# Altium schematic symbol library 芯片.SchLib: 9 symbols
Pins are listed as number, name and electrical type; pins without a type are passive.

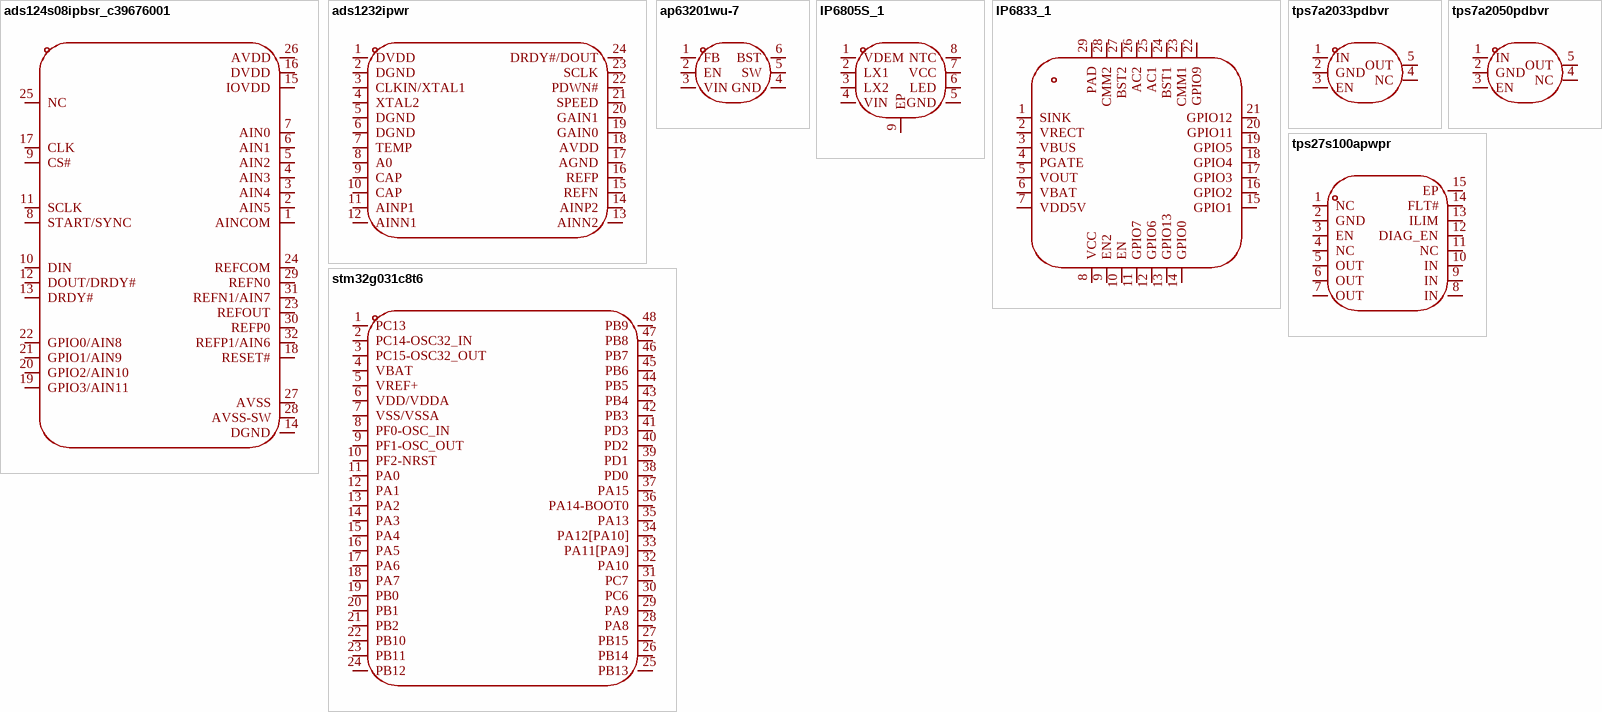
[diagram p0: symbols ads124s08ipbsr_c39676001 to tps27s100apwpr]

## ads124s08ipbsr_c39676001
designator U??  (value not drawn)
分辨率(位):24;采样率:4kHz;工作电压:2.7V~5.25V;接口类型:SPI;; Manufacturer: TI(德州仪器); AddInBom: yes; ModelId: 0723864a05e7424ab80b3c78d6a7d93a; ModelName: TQFP-32_L5.0-W5.0-H1.2-LS7.0-P0.50; ModelTransform: 277.58783,277.58783,0,90,0,0,0.013,0,0; Resolution (Bits): 24; Sampling Rate: 4kHz; number of channels: 12; Interface: SPI; differential input: 是; Clock/Oscillator: 内置; Clock Frequency: 4.096MHz; Programmable Gain: 支持; Quiescent Current (Iq): 280uA; Symbol: ADS124S08IPBSR_C39676001; LCSC Part Name: 具有PGA和电压基准的低功耗、低噪声、高集成度6通道及12通道4kSPS、24位∑-Δ ADC; SupplierPart: C39676001; ManufacturerPart: ADS124S08IPBSR; Supplier Footprint: TQFP-32(5x5); JLCPCB Part Class: Extended Part; Datasheet: https://www.ti.com.cn/cn/lit/ds/symlink/ads124s08.pdf?ts=1739413233444&ref_url=https%253A%252F%252Fwww.ti.com.cn%252Fproduct%252Fcn%252FADS124S08; Supplier: LCSC; ConvertToPcb: yes; FootprintName: TQFP-32_L5.0-W5.0-P0.50-LS7.0-BL; Voltage - Supply: 2.7V~5.25V; Operating Temperature: -50℃~+125℃; Voltage Reference: 内置; Features: 多路复用器；双极性电源；自动校准；内置温度传感器
footprint TQFP-32_L5.0-W5.0-P0.50-LS7.0-BL
pins: 1 AINCOM, 2 AIN5, 3 AIN4, 4 AIN3, 5 AIN2, 6 AIN1, 7 AIN0, 8 START/SYNC, 9 CS#, 10 DIN, 11 SCLK, 12 DOUT/DRDY#, 13 DRDY#, 14 DGND, 15 IOVDD, 16 DVDD, 17 CLK, 18 RESET#, 19 GPIO3/AIN11, 20 GPIO2/AIN10, 21 GPIO1/AIN9, 22 GPIO0/AIN8, 23 REFOUT, 24 REFCOM, 25 NC, 26 AVDD, 27 AVSS, 28 AVSS-SW, 29 REFN0, 30 REFP0, 31 REFN1/AIN7, 32 REFP1/AIN6

## ads1232ipwr
designator U??  (value not drawn)
分辨率(位):24;采样率:10Hz;工作电压:2.7V~5.3V;接口类型:SPI;; Manufacturer: TI(德州仪器); AddInBom: yes; ModelId: 57e278220af748a2882c4abba4094eb9; ModelName: TSSOP-24_L7.8-W4.4-H1.0-LS6.4-P0.65; ModelTransform: 252.188,307.086,0,90,0,0,0,0,0; Resolution (Bits): 24; Sampling Rate: 10Hz; number of channels: 2; Interface: SPI; differential input: 是; Clock/Oscillator: 内置；外置; Clock Frequency: 4.9152MHz；200kHz~8MHz; Voltage Reference: 外置; Programmable Gain: 支持; Temperature Sensors: 内置; ADC architecture: Sigma-Delta; Data rate: 80Hz；10Hz; Quiescent Current (Iq): 1.3uA; Full-Scale Range(FSR): 39mV；1.25V；19.5mV；2.5V; Symbol: ADS1232IPW; LCSC Part Name: 用于桥式传感器的24bit 模数转换器; SupplierPart: C27919; ManufacturerPart: ADS1232IPWR; Supplier Footprint: TSSOP-24; JLCPCB Part Class: Extended Part; Datasheet: https://www.ti.com/cn/lit/gpn/ads1232; Supplier: LCSC; ConvertToPcb: yes; FootprintName: TSSOP-24_L7.8-W4.4-P0.65-LS6.4-BL; Voltage - Supply: 2.7V~5.3V; Integral non - linearity: -; Operating Temperature: -40℃~+105℃; Signal-to-Noise Ratio: -; Voltage Reference Drift: -
footprint TSSOP-24_L7.8-W4.4-P0.65-LS6.4-BL
footprint Model Name (Footprint not found)
pins: 1 DVDD, 2 DGND, 3 CLKIN/XTAL1, 4 XTAL2, 5 DGND, 6 DGND, 7 TEMP, 8 A0, 9 CAP, 10 CAP, 11 AINP1, 12 AINN1, 13 AINN2, 14 AINP2, 15 REFN, 16 REFP, 17 AGND, 18 AVDD, 19 GAIN0, 20 GAIN1, 21 SPEED, 22 PDWN#, 23 SCLK, 24 DRDY#/DOUT

## ap63201wu-7
designator U??  (value not drawn)
功能类型:降压型;工作电压:3.8V~32V;输出电压:-;输出电流:2A;输出类型:可调;; Manufacturer: DIODES(美台); AddInBom: yes; ModelId: 2c4039b5b88644c1bda4b4ba9e971667; ModelName: TSOT-23-6_L2.9-W1.6-H1.1-LS2.8-P0.95; ModelTransform: 110.45568,114.173,0,180,0,0,-0.005,-0.0005,0; Function: 降压型; Output Current: 2A; Frequency - Switching: 500kHz; Synchronous Rectifier: 是; Number of Outputs: 1; Topology: 降压式; Quiescent Current: 22uA; Switch tube (built-in/external): 内置; Output Type: 可调; Symbol: AP63201WU-7; LCSC Part Name: 降压型 2A 3.8V~32V; SupplierPart: C2071044; ManufacturerPart: AP63201WU-7; Supplier Footprint: TSOT-23-6; JLCPCB Part Class: Extended Part; Datasheet: https://item.szlcsc.com/datasheet/AP63201WU-7/2162627.html; Supplier: LCSC; ConvertToPcb: yes; FootprintName: TSOT-23-6_L2.9-W1.6-P0.95-LS2.8-BR; Voltage - Supply: 3.8V~32V; Output Voltage: -; Operating Temperature: -40℃~+85℃; Features: 轻载高效模式；逐波限流；过流保护；EMI优化(抖频模式)；打嗝限流
footprint TSOT-23-6_L2.9-W1.6-P0.95-LS2.8-BR
pins: 1 FB, 2 EN, 3 VIN, 4 GND, 5 SW, 6 BST

## IP6805S_1
designator U??  (value not drawn)
Symbol: IP6805S_1
footprint ESOP-8_L4.9-W3.9-P1.27-LS6.0-BL-EP3.1
pins: 1 VDEM, 2 LX1, 3 LX2, 4 VIN, 5 GND, 6 LED, 7 VCC, 8 NTC, 9 EP

## IP6833_1
designator U??  (value not drawn)
Symbol: IP6833_1
footprint IP6833
pins: 1 SINK, 2 VRECT, 3 VBUS, 4 PGATE, 5 VOUT, 6 VBAT, 7 VDD5V, 8 VCC, 9 EN2, 10 EN, 11 GPIO7, 12 GPIO6, 13 GPIO13, 14 GPIO0, 15 GPIO1, 16 GPIO2, 17 GPIO3, 18 GPIO4, 19 GPIO5, 20 GPIO11, 21 GPIO12, 22 GPIO9, 23 CMM1, 24 BST1, 25 AC1, 26 AC2, 27 BST2, 28 CMM2, 29 PAD

## stm32g031c8t6
designator U??  (value not drawn)
CPU内核:ARM Cortex-M0+;CPU最大主频:64MHz;CPU位数:32 Bit;; Manufacturer: ST(意法半导体); AddInBom: yes; ModelId: 093be70396ff421eb2cdb946d5311efc; ModelName: LQFP-48_L7.0-W7.0-H1.4-LS9.0-P0.50; ModelTransform: 354.331,354.331,0,0,0,0,0,0,0; CPU Maximum Speed: 64MHz; Core Size: 32 Bit; Program Storage Size: 64KB; Program Memory Type: FLASH; RAM Size: 8KB; Number of I/O: 44; ADC (Bit): 12bit; Oscillator Type: 内置+外置; Voltage - Supply: 1.7V~3.6V; Symbol: STM32G031C8T6; LCSC Part Name: 主流Arm Cortex-M0+ MCU，具有64 KB Flash存储器、8 KB RAM、64 MHz CPU、2x USART、定时器、ADC和通信接口，1.7-3.6V; SupplierPart: C432205; ManufacturerPart: STM32G031C8T6; Supplier Footprint: LQFP-48(7x7); JLCPCB Part Class: Extended Part; Datasheet: https://item.szlcsc.com/datasheet/STM32G031C8T6/428993.html; Supplier: LCSC; ConvertToPcb: yes; FootprintName: LQFP-48_L7.0-W7.0-P0.50-LS9.0-BL; CPU Core: ARM Cortex-M0+; EEPROM: -; Operating Temperature: -40℃~+85℃
footprint LQFP-48_L7.0-W7.0-P0.50-LS9.0-BL
pins: 1 PC13, 2 PC14-OSC32_IN, 3 PC15-OSC32_OUT, 4 VBAT, 5 VREF+, 6 VDD/VDDA, 7 VSS/VSSA, 8 PF0-OSC_IN, 9 PF1-OSC_OUT, 10 PF2-NRST, 11 PA0, 12 PA1, 13 PA2, 14 PA3, 15 PA4, 16 PA5, 17 PA6, 18 PA7, 19 PB0, 20 PB1, 21 PB2, 22 PB10, 23 PB11, 24 PB12, 25 PB13, 26 PB14, 27 PB15, 28 PA8, 29 PA9, 30 PC6, 31 PC7, 32 PA10, 33 PA11[PA9], 34 PA12[PA10], 35 PA13, 36 PA14-BOOT0, 37 PA15, 38 PD0, 39 PD1, 40 PD2, 41 PD3, 42 PB3, 43 PB4, 44 PB5, 45 PB6, 46 PB7, 47 PB8, 48 PB9

## tps7a2033pdbvr
designator U??  (value not drawn)
输出类型:固定;最大输入电压:6V;输出电压:3.3V;输出电流:300mA;输出极性:正极;; Manufacturer: TI(德州仪器); AddInBom: yes; ModelId: 7ba65df16e7b4570af156e925f9c37fe; ModelName: SOT-23-5_L2.9-W1.6-P0.95-LS2.8-BR; ModelTransform: 114.173,114.173,0,90,0,0,0,0,0; Output Type: 固定; Maximum Input Voltage: 6V; Output Voltage: 3.3V; Output Current: 300mA; Dropout Voltage: 140mV@(300mA); standby current: 15uA; Output Polarity: 正极; Number of Outputs: 1; Symbol: TPS7A2033PDBVR; LCSC Part Name: 具有高 PSRR 的 300mA、超低噪声、低 IQ、低压降 (LDO) 线性稳压器; SupplierPart: C2862740; ManufacturerPart: TPS7A2033PDBVR; Supplier Footprint: SOT-23-5; JLCPCB Part Class: Extended Part; Datasheet: https://www.ti.com/cn/lit/gpn/tps7a20; Supplier: LCSC; ConvertToPcb: yes; FootprintName: SOT-23-5_L2.9-W1.6-P0.95-LS2.8-BR; Feature: 防静电保护；软启动；浪涌保护；低ESR；热保护(TSD)；欠压闭锁；过流保护(OCP)；带使能；防倒灌; Operating Temperature: -40℃~+125℃@(Tj)
footprint SOT-23-5_L2.9-W1.6-P0.95-LS2.8-BR
pins: 1 IN, 2 GND, 3 EN, 4 NC, 5 OUT

## tps7a2050pdbvr
designator U??  (value not drawn)
输出极性:正极;工作电压:6V;输出电压:5V;输出电流:300mA;电源纹波抑制比(PSRR):65dB@(100Hz);输出类型:固定;; Manufacturer: TI(德州仪器); AddInBom: yes; ModelId: 7ba65df16e7b4570af156e925f9c37fe; ModelName: SOT-23-5_L2.9-W1.6-P0.95-LS2.8-BR; ModelTransform: 114.173,114.173,0,90,0,0,0,0,0; Output Configuration: 正极; Voltage - Supply: 6V; Output Voltage: 5V; Output Current: 300mA; Voltage Dropout: 140mV@(300mA); standby current: 6.5uA; Noise: 10uVrms; Output Type: 固定; Number of Outputs: 1; Symbol: TPS7A2050PDBVR; LCSC Part Name: 800mV~5.5V 300mA 6V; SupplierPart: C2864504; ManufacturerPart: TPS7A2050PDBVR; Supplier Footprint: SOT-23-5; JLCPCB Part Class: Extended Part; Datasheet: https://www.ti.com/cn/lit/ds/symlink/tps7a20.pdf; Supplier: LCSC; ConvertToPcb: yes; FootprintName: SOT-23-5_L2.9-W1.6-P0.95-LS2.8-BR; Power Supply Rejection Ratio (PSRR): 65dB@(100Hz); Features: 使能控制；输入欠压保护；内置软启动；短路保护；过流保护；输出放电；热关断; Operating Temperature: -40℃~+125℃@(Tj)
footprint SOT-23-5_L2.9-W1.6-P0.95-LS2.8-BR
pins: 1 IN, 2 GND, 3 EN, 4 NC, 5 OUT

## tps27s100apwpr
designator U??  (value not drawn)
类型:高侧开关;通道数:1;输入控制逻辑:高电平有效;工作电压:3.5V~40V;最大连续电流:4A;导通电阻:80mΩ;; Manufacturer: TI(德州仪器); AddInBom: yes; ModelId: 02f1f60386074b2ca8e111040ac061f2; ModelName: TSSOP-14_L5.0-W4.4-H1.0-LS6.4-P0.65; ModelTransform: 236.714,196.85,0,90,0,0,0,0.0005,0; Number of Channels: 1; Control Input Logic: 高电平有效; Maximum Continuous Current: 4A; RDS(on): 80mΩ; Symbol: TPS27S100APWPR; LCSC Part Name: 单通道高侧开关，具备全面诊断功能、宽工作电压范围和可调节电流限制; SupplierPart: C2879389; ManufacturerPart: TPS27S100APWPR; Supplier Footprint: HTSSOP-14-EP; JLCPCB Part Class: Extended Part; Datasheet: https://www.ti.com/cn/lit/ds/symlink/tps27s100.pdf; Supplier: LCSC; ConvertToPcb: yes; FootprintName: TSSOP-14_L5.0-W4.4-P0.65-LS6.4-BL-EP; Type: 高侧开关; Voltage - Supply: 3.5V~40V; Features: 集成电荷泵；短路保护；反向电流阻断；过温保护；过流保护；欠压锁定; Operating Temperature	-: -40℃~+125℃
footprint TSSOP-14_L5.0-W4.4-P0.65-LS6.4-BL-EP
pins: 1 NC, 2 GND, 3 EN, 4 NC, 5 OUT, 6 OUT, 7 OUT, 8 IN, 9 IN, 10 IN, 11 NC, 12 DIAG_EN, 13 ILIM, 14 FLT#, 15 EP